# Altium schematic symbol library SC7538-08UTG.SchLib: 1 symbol
Pins are listed as number, name and electrical type; pins without a type are passive.

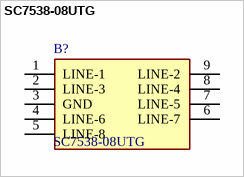
[diagram p0: symbol SC7538-08UTG]

## SC7538-08UTG
designator B?
ESD Suppressors / TVS Diodes 5V 3A +30/-22kV uDFN3810-9L Diode array AEC-Q101; Manufacturer_Name: LITTELFUSE; Geometry.Height: 0.55mm; Mouser Part Number: 576-SC7538-08UTG; Mouser Price/Stock: https://www.mouser.co.uk/ProductDetail/Littelfuse/SC7538-08UTG?qs=Li%252BoUPsLEnt7O3OzEjruww%3D%3D; Manufacturer_Part_Number: SC7538-08UTG; Datasheet Link: https://www.littelfuse.com/media?resourcetype=datasheets&itemid=59382b8d-537a-4c7e-9d68-ddc6a1cc92ed&filename=littelfuse-tvs-diode-array-sc7538-08utg-datasheet
footprint SC753808UTG
pins: 1 LINE-1, 2 LINE-3, 3 GND, 4 LINE-6, 5 LINE-8, 6 LINE-7, 7 LINE-5, 8 LINE-4, 9 LINE-2